# Altium footprint library TitansLib.PcbLib: 333 footprints (part 4 of 21)
Each footprint in its own frame and in the unit in brackets; x right, y up, seen from the top. Pads: shape width x height; smd on the part's side, far side on the other; paste and mask are expansions set on the pad; w line width, h text height; cw(c..) or ccw(c..) is an arc to the next point about the centre after c.
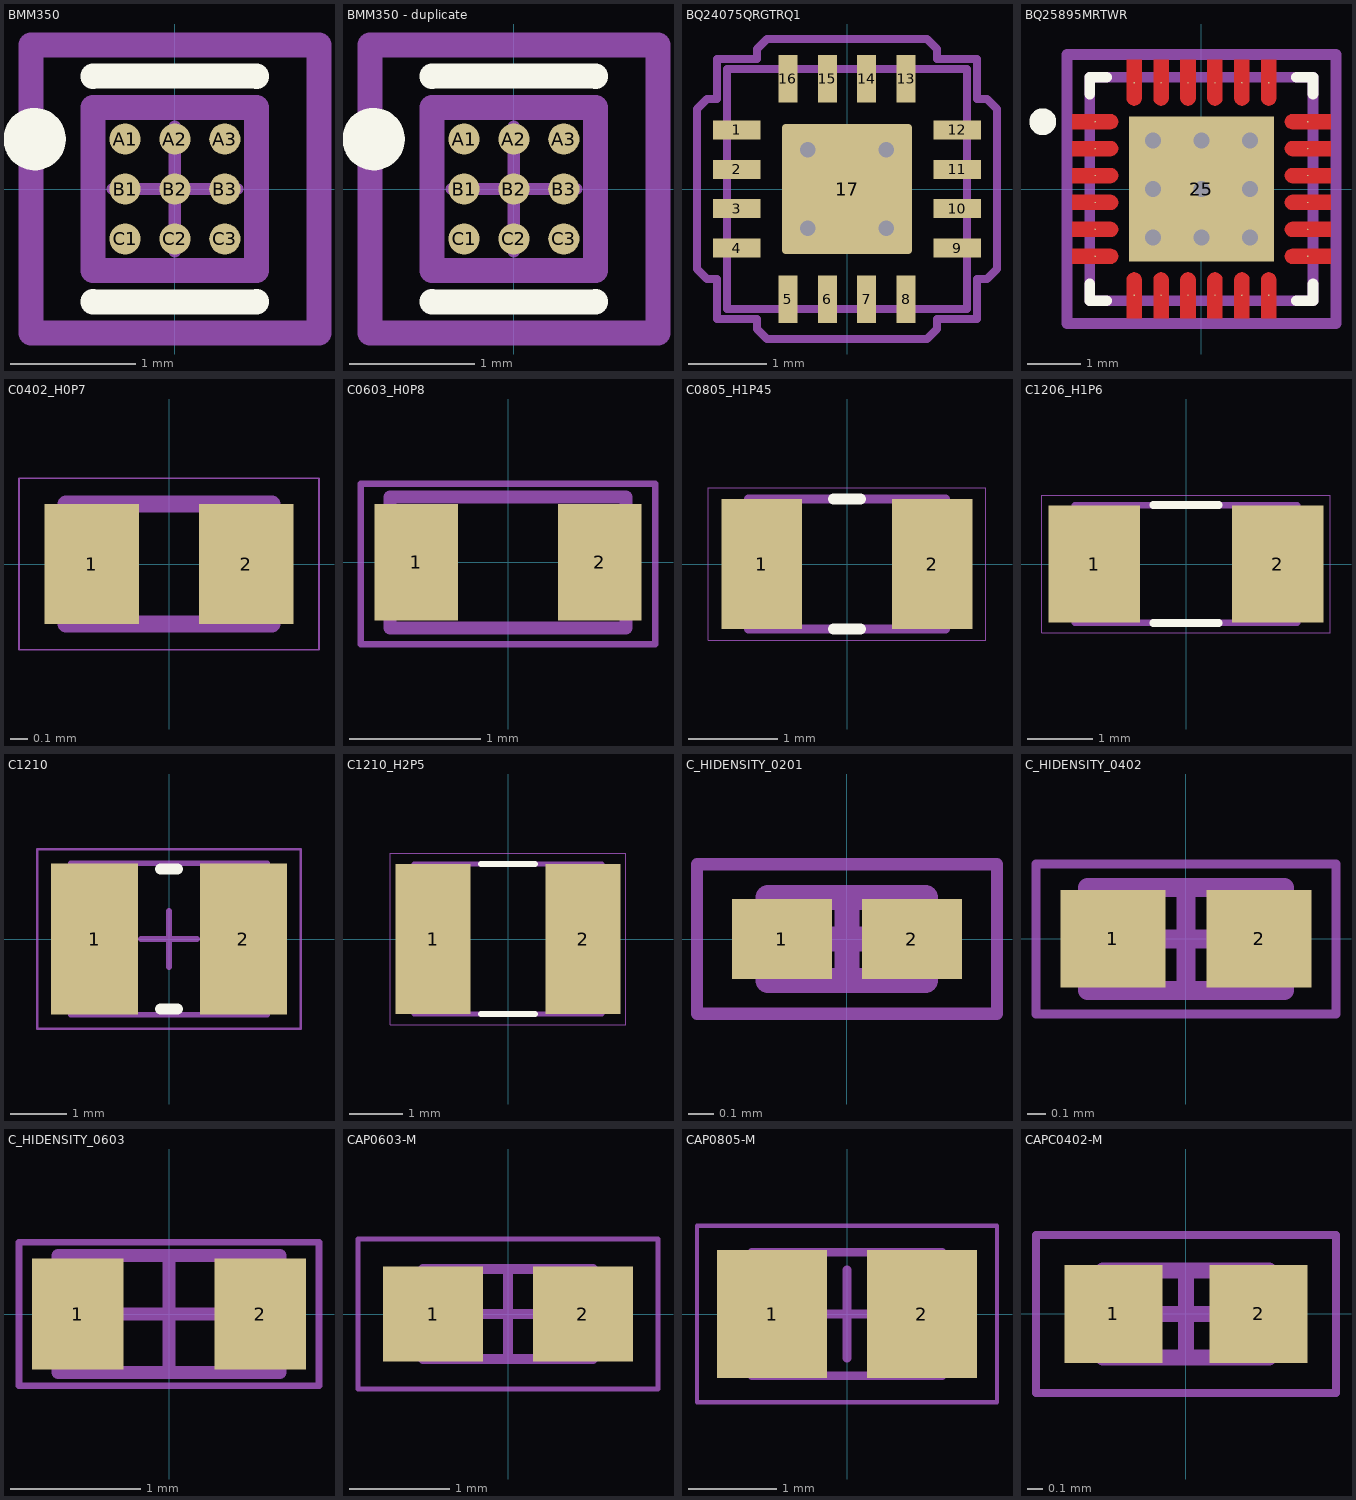
[diagram p3: the footprints below, top view; thin cyan lines are the x and y axes]

## BMM350 [mm]
pads (9):
  round 0.25 smd paste+0 mask+0: A1(-0.4,0.4) A2(0,0.4) A3(0.4,0.4) B1(-0.4,0) B2(0,0) B3(0.4,0) C1(-0.4,-0.4) C2(0,-0.4) C3(0.4,-0.4)
Top Overlay:
  circle w0.25: c-1.125,0.4 r0.125
  lines w0.2: -0.655,-0.9 -0.655,-0.905 0.655,-0.905 0.655,-0.9 ; -0.655,0.9 -0.655,0.905 0.655,0.905 0.655,0.9
Top 3D Body:
  lines w0.2: -0.655,-0.655 -0.655,0.655 0.655,0.655 0.655,-0.655 -0.655,-0.655
Top Courtyard:
  lines w0.2: -1.155,-1.155 -1.155,1.155 1.155,1.155 1.155,-1.155 -1.155,-1.155
Top Component Center:
  lines w0.1: -0.5,0 0.5,0 ; 0,-0.5 0,0.5
Top Assembly:
  lines w0.2: -1.155,-1.155 -1.155,1.155 1.155,1.155 1.155,-1.155 -1.155,-1.155
3D body "IC_Bosch_Sensortec_BMM350_eec.STEP": height 0.25, standoff 0, extent -1.155,-1.155 1.155,1.155

## BMM350 - duplicate [mm]
pads (9):
  round 0.25 smd paste+0 mask+0: A1(-0.4,0.4) A2(0,0.4) A3(0.4,0.4) B1(-0.4,0) B2(0,0) B3(0.4,0) C1(-0.4,-0.4) C2(0,-0.4) C3(0.4,-0.4)
Top Overlay:
  circle w0.25: c-1.125,0.4 r0.125
  lines w0.2: -0.655,-0.9 -0.655,-0.905 0.655,-0.905 0.655,-0.9 ; -0.655,0.9 -0.655,0.905 0.655,0.905 0.655,0.9
Top 3D Body:
  lines w0.2: -0.655,-0.655 0.655,-0.655 0.655,0.655 -0.655,0.655 -0.655,-0.655
Top Courtyard:
  lines w0.2: -1.155,-1.155 1.155,-1.155 1.155,1.155 -1.155,1.155 -1.155,-1.155
Top Component Center:
  lines w0.1: -0.5,0 0.5,0 ; 0,-0.5 0,0.5
Top Assembly:
  lines w0.2: -1.155,-1.155 1.155,-1.155 1.155,1.155 -1.155,1.155 -1.155,-1.155
3D body "IC_Bosch_Sensortec_BMM350_eec.STEP": height 0.25, standoff 0, extent -1.155,-1.155 1.155,1.155

## BQ24075QRGTRQ1 [mm]
pads (17):
  rect 0.6x0.24 smd mask+0.07: 1(-1.4,0.75) 2(-1.4,0.25) 3(-1.4,-0.25) 4(-1.4,-0.75) 9(1.4,-0.75) 10(1.4,-0.25) 11(1.4,0.25) 12(1.4,0.75)
  rect 0.24x0.6 smd mask+0.07: 5(-0.75,-1.4) 6(-0.25,-1.4) 7(0.25,-1.4) 8(0.75,-1.4) 13(0.75,1.4) 14(0.25,1.4) 15(-0.25,1.4) 16(-0.75,1.4)
  rrect5% 1.65x1.65 smd mask+0.07: 17(0,0)
via -0.5,-0.5 diameter 0.4 hole 0.2
via 0.5,-0.5 diameter 0.4 hole 0.2
via 0.5,0.5 diameter 0.4 hole 0.2
via -0.5,0.5 diameter 0.4 hole 0.2
Top Courtyard:
  lines w0.1: -1.905,-1.016 -1.778,-1.143 -1.651,-1.143 -1.651,-1.651 -1.143,-1.651 -1.143,-1.778 -1.016,-1.905 1.016,-1.905 1.143,-1.778 1.143,-1.651 1.651,-1.651 1.651,-1.143 1.778,-1.143 1.905,-1.016 1.905,1.016 1.778,1.143 1.651,1.143 1.651,1.651 1.143,1.651 1.143,1.778 1.016,1.905 -1.016,1.905 -1.143,1.778 -1.143,1.651 -1.651,1.651 -1.651,1.143 -1.778,1.143 -1.905,1.016 -1.905,-1.016
Top Assembly:
  lines w0.1: -1.524,-1.524 1.524,-1.524 1.524,1.524 -1.524,1.524 -1.524,-1.524
  text "'.Designator'" at -1.1,-0.182 h1
3D body "BQ24075QRGTRQ1.stp": height 1, standoff 0, extent -1.5,-1.5 1.5,1.5

## BQ25895MRTWR [mm]
pads (25):
  round 0.025 smd mask+0.07: 1(-1.975,1.25) 2(-1.975,0.75) 3(-1.975,0.25) 4(-1.975,-0.25) 5(-1.975,-0.75) 6(-1.975,-1.25) 7(-1.25,-1.975) 8(-0.75,-1.975) 9(-0.25,-1.975) 10(0.25,-1.975) 11(0.75,-1.975) 12(1.25,-1.975) 13(1.975,-1.25) 14(1.975,-0.75) 15(1.975,-0.25) 16(1.975,0.25) 17(1.975,0.75) 18(1.975,1.25) 19(1.25,1.975) 20(0.75,1.975) 21(0.25,1.975) 22(-0.25,1.975) 23(-0.75,1.975) 24(-1.25,1.975)
  rect 2.7x2.7 smd paste-1000 mask+0.05: 25(0,0)
via 0.9,-0.9 diameter 0.6 hole 0.3
via 0.9,0 diameter 0.6 hole 0.3
via 0.9,0.9 diameter 0.6 hole 0.3
via 0,-0.9 diameter 0.6 hole 0.3
via 0,0 diameter 0.6 hole 0.3
via 0,0.9 diameter 0.6 hole 0.3
via -0.9,-0.9 diameter 0.6 hole 0.3
via -0.9,0 diameter 0.6 hole 0.3
via -0.9,0.9 diameter 0.6 hole 0.3
Top Layer:
  region: 1.11,-2.4 1.11,-1.69 1.11,-1.676 1.115,-1.649 1.126,-1.624 1.141,-1.601 1.161,-1.581 1.184,-1.566 1.209,-1.555 1.236,-1.55 1.25,-1.55 1.264,-1.55 1.291,-1.555 1.316,-1.566 1.339,-1.581 1.359,-1.601 1.374,-1.624 1.385,-1.649 1.39,-1.676 1.39,-1.69 1.39,-2.4
  region: 0.61,-2.4 0.61,-1.69 0.61,-1.676 0.615,-1.649 0.626,-1.624 0.641,-1.601 0.661,-1.581 0.684,-1.566 0.709,-1.555 0.736,-1.55 0.75,-1.55 0.764,-1.55 0.791,-1.555 0.816,-1.566 0.839,-1.581 0.859,-1.601 0.874,-1.624 0.885,-1.649 0.89,-1.676 0.89,-1.69 0.89,-2.4
  region: 0.11,-2.4 0.11,-1.69 0.11,-1.676 0.115,-1.649 0.126,-1.624 0.141,-1.601 0.161,-1.581 0.184,-1.566 0.209,-1.555 0.236,-1.55 0.25,-1.55 0.264,-1.55 0.291,-1.555 0.316,-1.566 0.339,-1.581 0.359,-1.601 0.374,-1.624 0.385,-1.649 0.39,-1.676 0.39,-1.69 0.39,-2.4
  region: -0.39,-2.4 -0.39,-1.69 -0.39,-1.676 -0.385,-1.649 -0.374,-1.624 -0.359,-1.601 -0.339,-1.581 -0.316,-1.566 -0.291,-1.555 -0.264,-1.55 -0.25,-1.55 -0.236,-1.55 -0.209,-1.555 -0.184,-1.566 -0.161,-1.581 -0.141,-1.601 -0.126,-1.624 -0.115,-1.649 -0.11,-1.676 -0.11,-1.69 -0.11,-2.4
  region: -0.89,-2.4 -0.89,-1.69 -0.89,-1.676 -0.885,-1.649 -0.874,-1.624 -0.859,-1.601 -0.839,-1.581 -0.816,-1.566 -0.791,-1.555 -0.764,-1.55 -0.75,-1.55 -0.736,-1.55 -0.709,-1.555 -0.684,-1.566 -0.661,-1.581 -0.641,-1.601 -0.626,-1.624 -0.615,-1.649 -0.61,-1.676 -0.61,-1.69 -0.61,-2.4
  region: -1.39,-2.4 -1.39,-1.69 -1.39,-1.676 -1.385,-1.649 -1.374,-1.624 -1.359,-1.601 -1.339,-1.581 -1.316,-1.566 -1.291,-1.555 -1.264,-1.55 -1.25,-1.55 -1.236,-1.55 -1.209,-1.555 -1.184,-1.566 -1.161,-1.581 -1.141,-1.601 -1.126,-1.624 -1.115,-1.649 -1.11,-1.676 -1.11,-1.69 -1.11,-2.4
  region: 2.4,-1.39 1.69,-1.39 1.676,-1.39 1.649,-1.385 1.624,-1.374 1.601,-1.359 1.581,-1.339 1.566,-1.316 1.555,-1.291 1.55,-1.264 1.55,-1.25 1.55,-1.236 1.555,-1.209 1.566,-1.184 1.581,-1.161 1.601,-1.141 1.624,-1.126 1.649,-1.115 1.676,-1.11 1.69,-1.11 2.4,-1.11
  region: 2.4,-0.89 1.69,-0.89 1.676,-0.89 1.649,-0.885 1.624,-0.874 1.601,-0.859 1.581,-0.839 1.566,-0.816 1.555,-0.791 1.55,-0.764 1.55,-0.75 1.55,-0.736 1.555,-0.709 1.566,-0.684 1.581,-0.661 1.601,-0.641 1.624,-0.626 1.649,-0.615 1.676,-0.61 1.69,-0.61 2.4,-0.61
  region: 2.4,-0.39 1.69,-0.39 1.676,-0.39 1.649,-0.385 1.624,-0.374 1.601,-0.359 1.581,-0.339 1.566,-0.316 1.555,-0.291 1.55,-0.264 1.55,-0.25 1.55,-0.236 1.555,-0.209 1.566,-0.184 1.581,-0.161 1.601,-0.141 1.624,-0.126 1.649,-0.115 1.676,-0.11 1.69,-0.11 2.4,-0.11
  region: 2.4,0.11 1.69,0.11 1.676,0.11 1.649,0.115 1.624,0.126 1.601,0.141 1.581,0.161 1.566,0.184 1.555,0.209 1.55,0.236 1.55,0.25 1.55,0.264 1.555,0.291 1.566,0.316 1.581,0.339 1.601,0.359 1.624,0.374 1.649,0.385 1.676,0.39 1.69,0.39 2.4,0.39
  region: 2.4,0.61 1.69,0.61 1.676,0.61 1.649,0.615 1.624,0.626 1.601,0.641 1.581,0.661 1.566,0.684 1.555,0.709 1.55,0.736 1.55,0.75 1.55,0.764 1.555,0.791 1.566,0.816 1.581,0.839 1.601,0.859 1.624,0.874 1.649,0.885 1.676,0.89 1.69,0.89 2.4,0.89
  region: 2.4,1.11 1.69,1.11 1.676,1.11 1.649,1.115 1.624,1.126 1.601,1.141 1.581,1.161 1.566,1.184 1.555,1.209 1.55,1.236 1.55,1.25 1.55,1.264 1.555,1.291 1.566,1.316 1.581,1.339 1.601,1.359 1.624,1.374 1.649,1.385 1.676,1.39 1.69,1.39 2.4,1.39
  region: 1.39,2.4 1.39,1.69 1.39,1.676 1.385,1.649 1.374,1.624 1.359,1.601 1.339,1.581 1.316,1.566 1.291,1.555 1.264,1.55 1.25,1.55 1.236,1.55 1.209,1.555 1.184,1.566 1.161,1.581 1.141,1.601 1.126,1.624 1.115,1.649 1.11,1.676 1.11,1.69 1.11,2.4
  region: 0.89,2.4 0.89,1.69 0.89,1.676 0.885,1.649 0.874,1.624 0.859,1.601 0.839,1.581 0.816,1.566 0.791,1.555 0.764,1.55 0.75,1.55 0.736,1.55 0.709,1.555 0.684,1.566 0.661,1.581 0.641,1.601 0.626,1.624 0.615,1.649 0.61,1.676 0.61,1.69 0.61,2.4
  region: 0.39,2.4 0.39,1.69 0.39,1.676 0.385,1.649 0.374,1.624 0.359,1.601 0.339,1.581 0.316,1.566 0.291,1.555 0.264,1.55 0.25,1.55 0.236,1.55 0.209,1.555 0.184,1.566 0.161,1.581 0.141,1.601 0.126,1.624 0.115,1.649 0.11,1.676 0.11,1.69 0.11,2.4
  region: -0.11,2.4 -0.11,1.69 -0.11,1.676 -0.115,1.649 -0.126,1.624 -0.141,1.601 -0.161,1.581 -0.184,1.566 -0.209,1.555 -0.236,1.55 -0.25,1.55 -0.264,1.55 -0.291,1.555 -0.316,1.566 -0.339,1.581 -0.359,1.601 -0.374,1.624 -0.385,1.649 -0.39,1.676 -0.39,1.69 -0.39,2.4
  region: -0.61,2.4 -0.61,1.69 -0.61,1.676 -0.615,1.649 -0.626,1.624 -0.641,1.601 -0.661,1.581 -0.684,1.566 -0.709,1.555 -0.736,1.55 -0.75,1.55 -0.764,1.55 -0.791,1.555 -0.816,1.566 -0.839,1.581 -0.859,1.601 -0.874,1.624 -0.885,1.649 -0.89,1.676 -0.89,1.69 -0.89,2.4
  region: -1.11,2.4 -1.11,1.69 -1.11,1.676 -1.115,1.649 -1.126,1.624 -1.141,1.601 -1.161,1.581 -1.184,1.566 -1.209,1.555 -1.236,1.55 -1.25,1.55 -1.264,1.55 -1.291,1.555 -1.316,1.566 -1.339,1.581 -1.359,1.601 -1.374,1.624 -1.385,1.649 -1.39,1.676 -1.39,1.69 -1.39,2.4
  region: -2.4,-1.11 -1.69,-1.11 -1.676,-1.11 -1.649,-1.115 -1.624,-1.126 -1.601,-1.141 -1.581,-1.161 -1.566,-1.184 -1.555,-1.209 -1.55,-1.236 -1.55,-1.25 -1.55,-1.264 -1.555,-1.291 -1.566,-1.316 -1.581,-1.339 -1.601,-1.359 -1.624,-1.374 -1.649,-1.385 -1.676,-1.39 -1.69,-1.39 -2.4,-1.39
  region: -2.4,-0.61 -1.69,-0.61 -1.676,-0.61 -1.649,-0.615 -1.624,-0.626 -1.601,-0.641 -1.581,-0.661 -1.566,-0.684 -1.555,-0.709 -1.55,-0.736 -1.55,-0.75 -1.55,-0.764 -1.555,-0.791 -1.566,-0.816 -1.581,-0.839 -1.601,-0.859 -1.624,-0.874 -1.649,-0.885 -1.676,-0.89 -1.69,-0.89 -2.4,-0.89
  region: -2.4,-0.11 -1.69,-0.11 -1.676,-0.11 -1.649,-0.115 -1.624,-0.126 -1.601,-0.141 -1.581,-0.161 -1.566,-0.184 -1.555,-0.209 -1.55,-0.236 -1.55,-0.25 -1.55,-0.264 -1.555,-0.291 -1.566,-0.316 -1.581,-0.339 -1.601,-0.359 -1.624,-0.374 -1.649,-0.385 -1.676,-0.39 -1.69,-0.39 -2.4,-0.39
  region: -2.4,0.39 -1.69,0.39 -1.676,0.39 -1.649,0.385 -1.624,0.374 -1.601,0.359 -1.581,0.339 -1.566,0.316 -1.555,0.291 -1.55,0.264 -1.55,0.25 -1.55,0.236 -1.555,0.209 -1.566,0.184 -1.581,0.161 -1.601,0.141 -1.624,0.126 -1.649,0.115 -1.676,0.11 -1.69,0.11 -2.4,0.11
  region: -2.4,0.89 -1.69,0.89 -1.676,0.89 -1.649,0.885 -1.624,0.874 -1.601,0.859 -1.581,0.839 -1.566,0.816 -1.555,0.791 -1.55,0.764 -1.55,0.75 -1.55,0.736 -1.555,0.709 -1.566,0.684 -1.581,0.661 -1.601,0.641 -1.624,0.626 -1.649,0.615 -1.676,0.61 -1.69,0.61 -2.4,0.61
  region: -2.4,1.39 -1.69,1.39 -1.676,1.39 -1.649,1.385 -1.624,1.374 -1.601,1.359 -1.581,1.339 -1.566,1.316 -1.555,1.291 -1.55,1.264 -1.55,1.25 -1.55,1.236 -1.555,1.209 -1.566,1.184 -1.581,1.161 -1.601,1.141 -1.624,1.126 -1.649,1.115 -1.676,1.11 -1.69,1.11 -2.4,1.11
Top Overlay:
  circle w0.25: c-2.95,1.25 r0.125
  lines w0.2: -2.075,-1.765 -2.075,-2.075 -1.765,-2.075 ; -2.075,1.765 -2.075,2.075 -1.765,2.075 ; 1.765,-2.075 2.075,-2.075 2.075,-1.765 ; 1.765,2.075 2.075,2.075 2.075,1.765
Top Paste:
  drawing of 28 lines, arcs and shapes, not listed
Top 3D Body:
  lines w0.2: -2.075,-2.075 -2.075,2.075 2.075,2.075 2.075,-2.075 -2.075,-2.075
Top Courtyard:
  lines w0.2: -2.5,-2.5 -2.5,2.5 2.5,2.5 2.5,-2.5 -2.5,-2.5
Top Component Center:
  lines w0.1: -0.5,0 0.5,0 ; 0,-0.5 0,0.5
Top Assembly:
  lines w0.2: -2.5,-2.5 -2.5,2.5 2.5,2.5 2.5,-2.5 -2.5,-2.5
  text "'.Designator'" at -1.25,0.038 h1
3D body "IC_Texas_Instruments_BQ25892RTWT_eec.STEP": height 0.25, standoff 0, extent -2.5,-2.5 2.5,2.5

## C0402_H0P7 [mm]
pads (2):
  rect 0.55x0.7 smd mask+0.05: 1(-0.45,0) 2(0.45,0)
Top Courtyard:
  lines w0.01: -0.875,-0.5 0.875,-0.5 0.875,0.5 -0.875,0.5 -0.875,-0.5
Top Assembly:
  lines w0.1: -0.6,-0.35 -0.6,0.35 0.6,0.35 0.6,-0.35 -0.6,-0.35
  text ".Designator" at -0.496,-0.19 h0.75
3D body "CAPC1005X06N.step": height 0.55, standoff 0, extent -0.525,-0.275 0.525,0.275

## C0603_H0P8 [mm]
pads (2):
  rect 0.64x0.89 smd mask+0.05: 1(-0.7,0) 2(0.7,0)
Top Courtyard:
  lines w0.05: -1.125,-0.625 1.125,-0.625 1.125,0.6 -1.125,0.6 -1.125,-0.625
Top Assembly:
  lines w0.1: -0.9,-0.5 -0.9,0.5 0.9,0.5 0.9,-0.5 -0.9,-0.5
  text ".Designator" at -0.835,-0.277 h1
3D body: height 1, standoff 0, extent 0.5,-0.499 0.9,0.499
3D body: height 1, standoff 0, extent -0.9,-0.499 -0.5,0.499
3D body: height 1, standoff 0, extent -0.5,-0.499 0.5,0.499

## C0805_H1P45 [mm]
pads (2):
  rect 0.9x1.45 smd mask+0.05: 1(-0.95,0) 2(0.95,0)
Top Overlay:
  lines w0.12: -0.15,-0.725 0.15,-0.725 ; -0.15,0.725 0.15,0.725
Top Courtyard:
  lines w0.01: -1.55,-0.85 1.55,-0.85 1.55,0.85 -1.55,0.85 -1.55,-0.85
Top Assembly:
  lines w0.1: -1.1,-0.725 -1.1,0.725 1.1,0.725 1.1,-0.725 -1.1,-0.725
  text ".Designator" at -1.051,-0.498 h0.75
3D body "CAPC2012X14N.step": height 1.45, standoff 0, extent -1.1,-0.725 1.1,0.725

## C1206_H1P6 [mm]
pads (2):
  rect 1.4x1.78 smd mask+0.05: 1(-1.4,0) 2(1.4,0)
Top Overlay:
  lines w0.12: -0.5,-0.9 0.5,-0.9 ; -0.5,0.9 0.5,0.9
Top Courtyard:
  lines w0.01: -2.2,-1.05 2.2,-1.05 2.2,1.05 -2.2,1.05 -2.2,-1.05
Top Assembly:
  lines w0.1: -1.7,-0.9 -1.7,0.9 1.7,0.9 1.7,-0.9 -1.7,-0.9
  text ".Designator" at -1.15,-0.625 h0.75
3D body "C1206_H1P6.STEP": height 1.6, standoff 0, extent -1.64,-0.8 1.64,0.8

## C1210 [mm] "Chip Capacitor, 2-Leads, Body 3.20x2.50mm, IPC Medium Density"
height 2
pads (2):
  rect 1.55x2.7 smd: 1(-1.325,0) 2(1.325,0)
Top Overlay:
  lines w0.2: -0.15,-1.25 0.15,-1.25 ; -0.15,1.25 0.15,1.25
Top Courtyard:
  lines w0.05: -2.35,-1.6 2.35,-1.6 2.35,1.6 -2.35,1.6 -2.35,-1.6
  lines w0.1: -0.5,0 0.5,0 ; 0,-0.5 0,0.5
Top Assembly:
  lines w0.1: -1.75,-1.35 1.75,-1.35 1.75,1.35 -1.75,1.35 -1.75,-1.35
3D body "C1210.step": height 2, standoff 0, extent -1.75,-1.35 1.75,1.35

## C1210_H2P5 [mm]
pads (2):
  rect 1.4x2.8 smd mask+0.05: 1(-1.4,0) 2(1.4,0)
Top Overlay:
  lines w0.12: -0.5,-1.4 0.5,-1.4 ; -0.5,1.4 0.5,1.4
Top Courtyard:
  lines w0.01: -2.2,-1.6 2.2,-1.6 2.2,1.6 -2.2,1.6 -2.2,-1.6
Top Assembly:
  lines w0.1: -1.75,-1.4 1.75,-1.4 1.75,1.4 -1.75,1.4 -1.75,-1.4
  text ".Designator" at -1.475,-0.55 h0.75
3D body: height 2.8, standoff 0, extent -1.75,-1.4 1.75,1.4

## C_HIDENSITY_0201 [mm]
height 0.26
pads (2):
  rect 0.4x0.32 smd: 1(-0.26,0) 2(0.26,0)
Top Courtyard:
  lines w0.05: -0.6,-0.3 -0.6,0.3 0.6,0.3 0.6,-0.3 -0.6,-0.3
  lines w0.1: -0.165,0 0.165,0 ; 0,-0.165 0,0.165
Top Assembly:
  lines w0.1: -0.315,-0.165 -0.315,0.165 0.315,0.165 0.315,-0.165 -0.315,-0.165
3D body "C_HIDENSITY_0201.step": height 0.26, standoff 0, extent -0.315,-0.165 0.315,0.165

## C_HIDENSITY_0402 [mm]
height 0.4
pads (2):
  rect 0.56x0.52 smd: 1(-0.39,0) 2(0.39,0)
Top Courtyard:
  lines w0.05: -0.8,-0.4 -0.8,0.4 0.8,0.4 0.8,-0.4 -0.8,-0.4
  lines w0.1: -0.275,0 0.275,0 ; 0,-0.275 0,0.275
Top Assembly:
  lines w0.1: -0.525,-0.275 -0.525,0.275 0.525,0.275 0.525,-0.275 -0.525,-0.275
3D body "C_HIDENSITY_0402.step": height 0.4, standoff 0, extent -0.525,-0.275 0.525,0.275

## C_HIDENSITY_0603 [mm]
height 0.55
pads (2):
  rect 0.7x0.85 smd: 1(-0.7,0) 2(0.7,0)
Top Courtyard:
  lines w0.05: -1.15,-0.55 1.15,-0.55 1.15,0.55 -1.15,0.55 -1.15,-0.55
  lines w0.1: -0.45,0 0.45,0 ; 0,-0.45 0,0.45
Top Assembly:
  lines w0.1: -0.85,-0.45 0.85,-0.45 0.85,0.45 -0.85,0.45 -0.85,-0.45
3D body "Chip2PinSM127P600-8N.step": height 0.55, standoff 0, extent -0.85,-0.45 0.85,0.45

## CAP0603-M [mm] "Chip Capacitor, 2-Leads, Body 1.60x0.80mm, IPC Medium Density"
height 0.9
pads (2):
  rect 1x0.95 smd mask+0.025: 1(-0.75,0) 2(0.75,0)
Top Courtyard:
  lines w0.05: -1.5,-0.75 1.5,-0.75 1.5,0.75 -1.5,0.75 -1.5,-0.75
  lines w0.1: -0.45,0 0.45,0 ; 0,-0.45 0,0.45
Top Assembly:
  lines w0.1: -0.85,-0.45 0.85,-0.45 0.85,0.45 -0.85,0.45 -0.85,-0.45
3D body "CAP0603-M.step": height 0.9, standoff 0, extent -0.85,-0.45 0.85,0.45

## CAP0805-M [mm] "Chip Capacitor, 2-Leads, Body 2.00x1.25mm, IPC Medium Density"
height 1.4
pads (2):
  rect 1.25x1.45 smd mask+0.05: 1(-0.85,0) 2(0.85,0)
Top Courtyard:
  lines w0.05: -1.7,-1 -1.7,1 1.7,1 1.7,-1 -1.7,-1
  lines w0.1: -0.5,0 0.5,0 ; 0,-0.5 0,0.5
Mechanical 13:
  lines w0.1: -1.075,-0.7 -1.075,0.7 1.075,0.7 1.075,-0.7 -1.075,-0.7
3D body "CAP0805-M.step": height 1.4, standoff 0, extent -1.075,-0.7 1.075,0.7

## CAPC0402-M [mm] "Chip Capacitor, 2-Leads, Body 1.00x0.50mm, IPC Medium Density"
height 0.55
pads (2):
  rect 0.62x0.62 smd mask+0.025: 1(-0.46,0) 2(0.46,0)
Top Courtyard:
  lines w0.05: -0.95,-0.5 -0.95,0.5 0.95,0.5 0.95,-0.5 -0.95,-0.5
  lines w0.1: -0.275,0 0.275,0 ; 0,-0.275 0,0.275
Mechanical 13:
  lines w0.1: -0.525,-0.275 -0.525,0.275 0.525,0.275 0.525,-0.275 -0.525,-0.275
3D body "CAPC0402-M.step": height 0.55, standoff 0, extent -0.525,-0.275 0.525,0.275